# Altium footprint library CRM2512-JW-103ELF.PcbLib: 3 footprints
Each footprint in its own frame and in the unit in brackets; x right, y up, seen from the top. Pads: shape width x height; smd on the part's side, far side on the other; paste and mask are expansions set on the pad; w line width, h text height; cw(c..) or ccw(c..) is an arc to the next point about the centre after c.
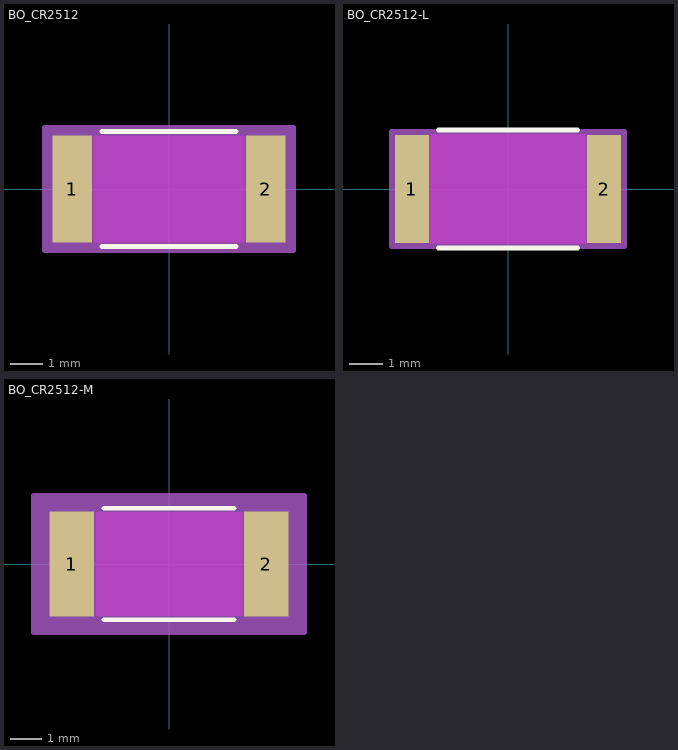
[diagram p0: the footprints below, top view; thin cyan lines are the x and y axes]

## BO_CR2512 [mil]
pads (2):
  rect 48x130 smd paste+0 mask+0: 1(-118,0) 2(118,0)
Top Layer keep-out:
  region: -92,-63 -92,63 92,63 92,-63
Top Overlay:
  lines w6: -81.89,-70 81.89,-70 ; -81.89,70 81.89,70
  text ".Designator" at -137.5,-25 h50
Keep-Out Layer:
  region: -92,-65 -92,65 92,65 92,-65
Mechanical 13:
  lines w1: -128,-65 -128,65 ; -128,-65 -94,-65 -94,65 -128,65 ; -128,-65 128,-65 ; -128,-65 -128,65 ; -128,65 128,65 ; 128,-65 94,-65 94,65 128,65 ; 128,-65 128,65 ; 128,-65 128,65
  text ".Designator" at -137.5,-25 h50
Mechanical 15:
  region: 152,-75 -152,-75 -152,75 152,75
  lines w6: -152,-75 -152,75 152,75 152,-75 -152,-75
3D body "BO_CR2512.step": height 30, standoff 0, extent -127.99,-65 127.99,65

## BO_CR2512-L [mil]
pads (2):
  rect 40x128 smd paste+0 mask+0: 1(-114,0) 2(114,0)
Top Layer keep-out:
  region: -92,-63 -92,63 92,63 92,-63
Top Overlay:
  lines w6: -82.35,-70 82.35,-70 ; -82.35,70 82.35,70
  text ".Designator" at -137.5,-25 h50
Keep-Out Layer:
  region: -92,-65 -92,65 92,65 92,-65
Mechanical 13:
  lines w1: -128,-65 -128,65 ; -128,-65 -94,-65 -94,65 -128,65 ; -128,-65 128,-65 ; -128,-65 -128,65 ; -128,65 128,65 ; 128,-65 94,-65 94,65 128,65 ; 128,-65 128,65 ; 128,-65 128,65
  text ".Designator" at -137.5,-25 h50
Mechanical 15:
  region: 138,-68 -138,-68 -138,68 138,68
  lines w6: -138,-68 -138,68 138,68 138,-68 -138,-68
3D body "BO_CR2512.step": height 30, standoff 0, extent -127.99,-65 127.99,65

## BO_CR2512-M [mil]
pads (2):
  rect 56x132 smd paste+0 mask+0: 1(-122,0) 2(122,0)
Top Layer keep-out:
  region: -92,-63 -92,63 92,63 92,-63
Top Overlay:
  lines w6: -81.53,-70 81.53,-70 ; -81.53,70 81.53,70
  text ".Designator" at -137.5,-25 h50
Keep-Out Layer:
  region: -92,-65 -92,65 92,65 92,-65
Mechanical 13:
  lines w1: -128,-65 -128,65 ; -128,-65 -94,-65 -94,65 -128,65 ; -128,-65 128,-65 ; -128,-65 -128,65 ; -128,65 128,65 ; 128,-65 94,-65 94,65 128,65 ; 128,-65 128,65 ; 128,-65 128,65
  text ".Designator" at -137.5,-25 h50
Mechanical 15:
  region: 170,-86 -170,-86 -170,86 170,86
  lines w6: -170,-86 -170,86 170,86 170,-86 -170,-86
3D body "BO_CR2512.step": height 30, standoff 0, extent -127.99,-65 127.99,65